# Altium integrated library PJ-060A (1).IntLib: 1 symbol
Pins are listed as number, name and electrical type; pins without a type are passive.

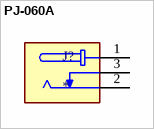
[diagram p0: symbol PJ-060A]

## PJ-060A
designator J?
Power Barrel Connector Jack 2.00mm ID (0.079), 5.50mm OD (0.217) Through Hole; MF: Same Sky; MP: PJ-060A; SnapEDA_Link: https://www.snapeda.com/parts/PJ-060A/Same+Sky/view-part/?ref=snap; Package: None; Value: *; Check_prices: https://www.snapeda.com/parts/PJ-060A/Same+Sky/view-part/?ref=eda
footprint SAMESKY_PJ-060A
pins: 1, 2, 3